# Altium footprint library aksima_footprint.PcbLib: 56 footprints (part 1 of 4)
Each footprint in its own frame and in the unit in brackets; x right, y up, seen from the top. Pads: shape width x height; smd on the part's side, far side on the other; paste and mask are expansions set on the pad; w line width, h text height; cw(c..) or ccw(c..) is an arc to the next point about the centre after c.
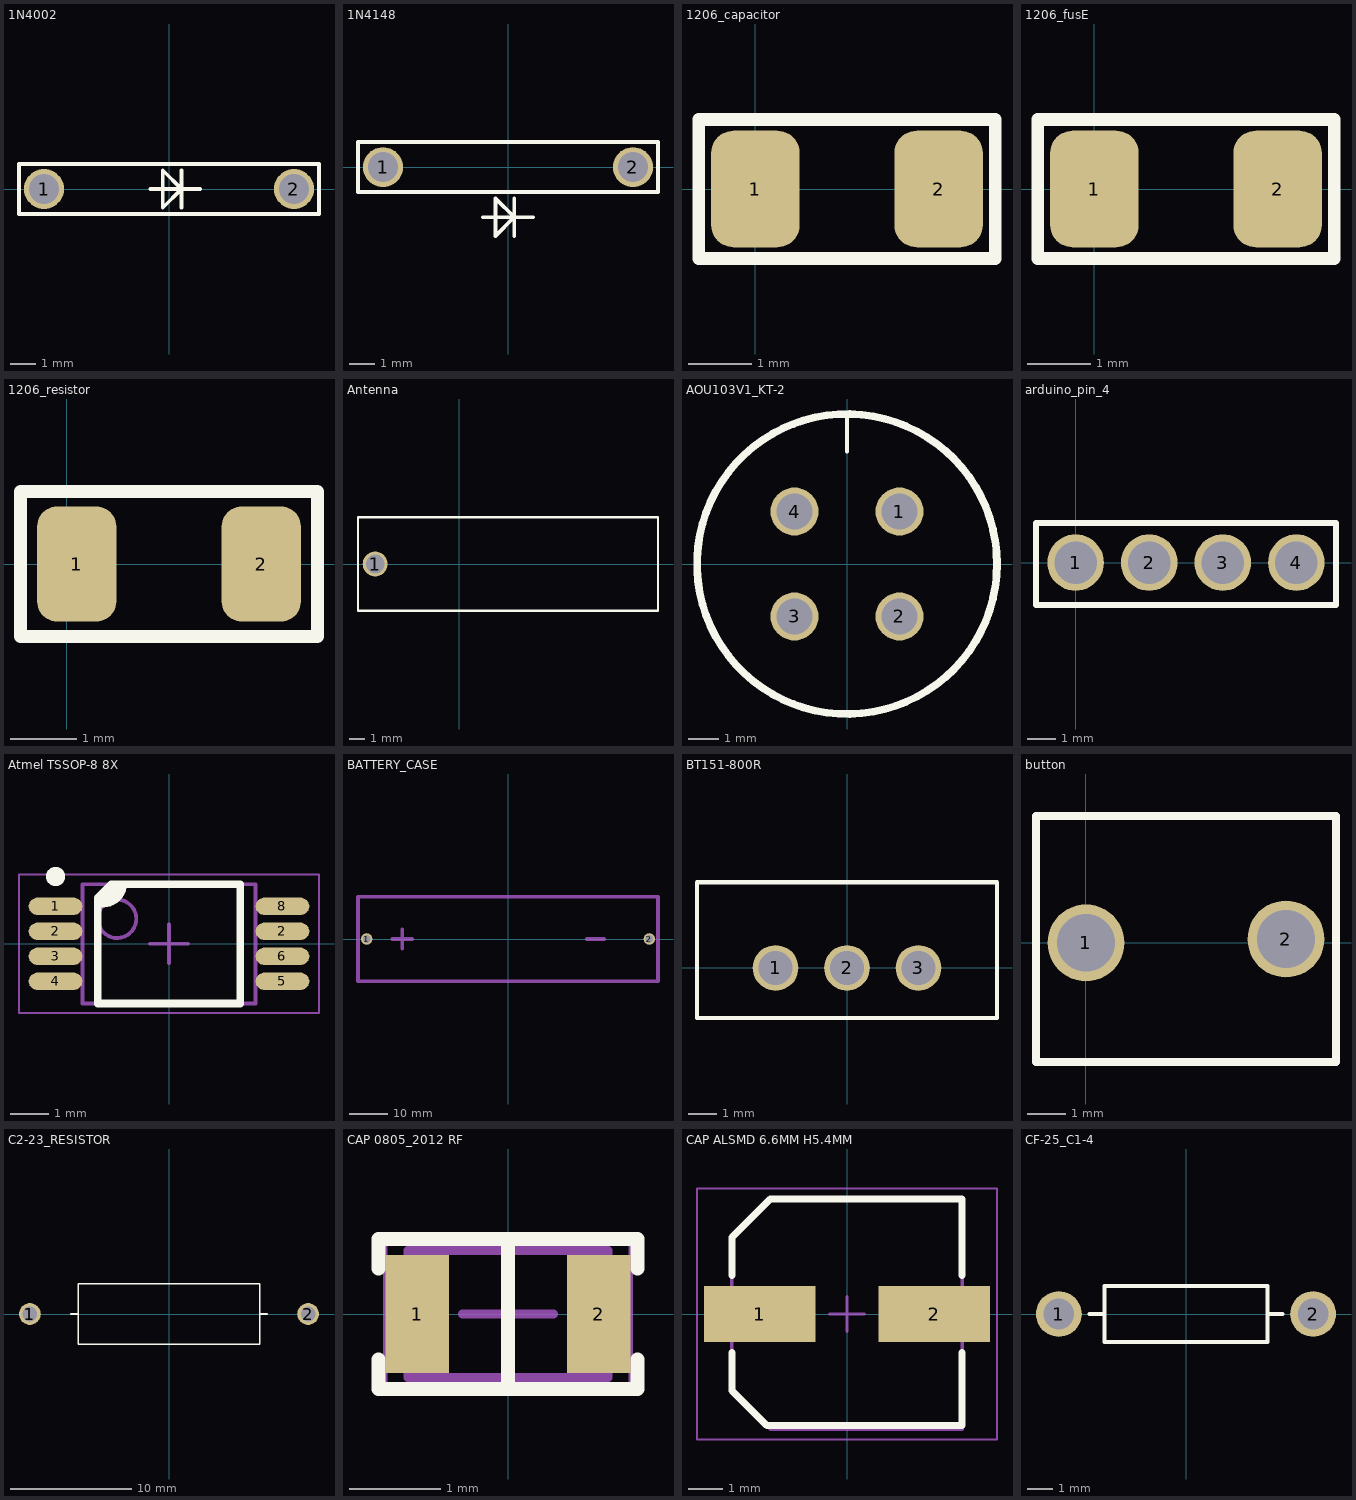
[diagram p0: the footprints below, top view; thin cyan lines are the x and y axes]

## 1N4002 [mm] "Axial rectifier diode, 1N4002"
pads (2):
  round 1.6 hole 1.2: 1(-5,0) 2(5,0)
Top Overlay:
  lines w0.15: -0.75,0 1.25,0 ; 0.5,-0.75 0.5,0.75 ; -6,-1 6,-1 6,1 -6,1 -6,0 -6,-1 ; -0.25,-0.75 0.5,0 -0.25,0.75 -0.25,-0.75 ; -0.25,0 -0.25,0
3D body "DO-204AL-BK.stp": height 2.8, standoff -2.5, extent -5.48,-1.34 5.48,1.34

## 1N4148 [mm] "Axial switching diode, 1N4148"
pads (2):
  round 1.6 hole 1.2: 1(-5,0) 2(5,0)
Top Overlay:
  lines w0.15: -1,-2 1,-2 ; 0.25,-2.75 0.25,-1.25 ; -0.5,-1.25 0.25,-2 -0.5,-2.75 -0.5,-1.25 ; -0.5,-1.25 -0.5,-1.25 ; -6,-1 6,-1 6,1 -6,1 -6,0 -6,-1 ; -0.5,-2 -0.5,-2
3D body "DIODE-1N4148.STEP": height 1.85, standoff -2.5, extent -5.31,-0.853 5.31,0.853

## 1206_capacitor [mm] "1206 capacitor footprint"
pads (2):
  rrect50% 1.4x1.85 smd: 1(0,0) 2(2.9,0)
Top Overlay:
  lines w0.2: -0.9,-1.1 3.8,-1.1 3.8,1.1 -0.9,1.1 -0.9,-1.1
3D body "CAPC1206.step": height 1, standoff 0, extent -0.1,-0.8 3.1,0.8

## 1206_fusE [mm] "Surface-mount fuse, 1206"
pads (2):
  rrect50% 1.4x1.85 smd: 1(0,0) 2(2.9,0)
Top Overlay:
  lines w0.2: -0.9,-1.1 -0.9,1.1 3.8,1.1 3.8,-1.1 -0.9,-1.1
3D body "Fuse_1206_3216Metric.step": height 0.5, standoff 0, extent -0.35,-0.92 3.15,0.92

## 1206_resistor [mm] "1206 resistor footprint"
pads (2):
  rrect50% 1.2x1.75 smd: 1(0.15,0) 2(2.95,0)
Top Overlay:
  lines w0.2: -0.7,-1.1 -0.7,1.1 3.8,1.1 3.8,-1.1 -0.7,-1.1
3D body "RES_3216_1206.step": height 0.85, standoff 0, extent -0.125,-0.865 3.225,0.865

## Antenna [mm] "Antenna footprint"
pads (1):
  round 1.6 hole 1.2: 1(-5.4,0)
Top Overlay:
  lines w0.15: -6.5,-3 -6.5,0 -6.5,3 12.75,3 12.75,-3 -6.5,-3
3D body "SW868-TH13.STEP": height 5.25, standoff -0.4, extent -5.8,-2.748 12.497,2.75

## AOU103V1_KT-2 [mm] "AOU103V1 optocoupler, KT-2 package"
pads (4):
  round 1.6 hole 1.2 unplated: 1(1.75,1.75) 2(1.75,-1.75) 3(-1.75,-1.75) 4(-1.75,1.75)
Top Overlay:
  circle w0.254: c0,0 r5
  lines w0.15: 0,3.75 0,5
3D body "??-2.STEP": height 6.6, standoff -3, extent -4.7,-4.7 4.7,5.4

## arduino_pin_4 [mm] "Four-position pin header"
pads (4):
  round 2 hole 1.5: 1(0,0) 2(2.6,0) 3(5.2,0) 4(7.8,0)
Top Overlay:
  lines w0.2: -1.4,-1.5 -1.4,1.4 9.2,1.4 9.2,-1.5 -1.4,-1.5
3D body "PLS-04.stp": height 8.2, standoff -3, extent -1.16,-1.298 9,1.2

## Atmel TSSOP-8 8X [mm] "TSSOP, 8-Leads, Body 3.00x4.40mm, Pitch 0.65mm, IPC Medium Density"
height 1.2
pads (8):
  oval 1.4x0.45 smd: 1(-2.95,0.975) 2(-2.95,0.325) 2(2.95,0.325) 3(-2.95,-0.325) 4(-2.95,-0.975) 5(2.95,-0.975) 6(2.95,-0.325) 8(2.95,0.975)
Top Overlay:
  circle w0.25: c-2.95,1.75 r0.125
  region: -1.5,1.55 -1.2,1.55 -1.2,1.451 -1.276,1.267 -1.417,1.126 -1.601,1.05 -1.7,1.05 -1.8,1.05 -1.8,1.25
  lines w0.2: -1.8,1.05 -1.7,1.05 ccw(c-1.7,1.55) -1.2,1.55 ; -1.85,-1.55 1.85,-1.55 1.85,1.55 -1.5,1.55 -1.85,1.2 -1.85,-1.55
Mechanical 13:
  circle w0.1: c-1.35,0.65 r0.5
  lines w0.1: -2.25,-1.55 -2.25,1.55 2.25,1.55 2.25,-1.55 -2.25,-1.55
Mechanical 15:
  lines w0.05: -3.9,-1.8 -3.9,1.8 3.9,1.8 3.9,-1.8 -3.9,-1.8
  lines w0.1: -0.5,0 0.5,0 ; 0,-0.5 0,0.5
3D body "TSSOP-8.STEP": height 1.2, standoff 0, extent -3.21,-1.5 3.211,1.5

## BATTERY_CASE [mm] "BATTERY CASE footprint"
pads (2):
  round 3 hole 2: 1(-36.75,0) 2(36.75,0)
Bottom 3D Body:
  lines w1: -39,10.5 -39,-11 39,-11 39,11 -39,11 ; -30,0 -25,0 ; -27.5,-2.5 -27.5,2.5 ; 20.5,0 25,0
3D body "Porta_18650.STEP": height 21, standoff -4, extent -38.5,-10 38.5,10

## BT151-800R [mm] "BT151-800R thyristor"
pads (3):
  round 1.6 hole 1.2 unplated: 1(-2.5,0) 2(0,0) 3(2.5,0)
Top Overlay:
  lines w0.15: -5.25,-1.75 5.25,-1.75 5.25,3 -5.25,3 -5.25,-1.75
3D body "TO220ShortLegs.SLDPRT": height 20, standoff -3, extent -5.16,-1.55 5.16,2.75

## button [mm] "button footprint"
pads (2):
  round 2 hole 1.5: 1(0,0) 2(5.2,0.1)
Top Overlay:
  lines w0.2: -1.3,-3.1 -1.3,-0.825 -1.3,0.625 -1.3,3.3 6.5,3.3 6.5,-3.1 -1.3,-3.1

## C2-23_RESISTOR [mm] "C2-23 RESISTOR footprint"
pads (2):
  round 1.8 hole 1.2: 1(-11.5,0) 2(11.5,0)
Top Overlay:
  lines w0.15: -8.1,0 -7.5,0 ; 7.5,0 8.1,0 ; -7.5,-2.5 -7.5,2.5 7.5,2.5 7.5,-2.5 -1.4,-2.5 -7.5,-2.5
3D body "Res-2w-5-15mm-900.step": height 6.5, standoff -1.5, extent -11.83,-2.5 11.83,2.5

## CAP 0805_2012 RF [mm] "Surface-mount capacitor, 0805 (2012 metric)"
height 1.15
pads (2):
  rect 0.7x1.3 smd: 1(-1,0) 2(1,0)
Top Overlay:
  lines w0.15: -1.425,-0.5 -1.425,-0.825 1.425,-0.825 1.425,-0.5 ; -1.425,0.5 -1.425,0.825 1.425,0.825 1.425,0.5 ; -0.025,0.825 0,0.825 0,-0.825
Mechanical 13:
  lines w0.1: -1.1,-0.7 1.1,-0.7 1.1,0.7 -1.1,0.7 -1.1,-0.7
Mechanical 15:
  lines w0.05: -1.35,-0.8 1.35,-0.8 1.35,0.8 -1.35,0.8 -1.35,-0.8
  lines w0.1: -0.5,0 0.5,0 ; 0,-0.5 0,0.5
3D body "0805 cap.STEP": height 1.26, standoff -0.02, extent -1,-0.637 1,0.637

## CAP ALSMD 6.6MM H5.4MM [mm] "SMD aluminum electrolytic capacitor, 6.6 mm footprint, 5.4 mm height"
height 5.4
pads (2):
  rect 3.2x1.6 smd: 1(-2.5,0) 2(2.5,0)
Top Overlay:
  lines w0.2: -3.3,-1.1 -3.3,-2.2 -2.3,-3.2 3.3,-3.2 3.3,-2.675 3.3,-1.625 3.3,-1.1 ; -3.3,1.1 -3.3,2.2 -2.2,3.3 3.3,3.3 3.3,1.1
Mechanical 13:
  lines w0.1: -3.3,-2.2 -3.3,2.2 -2.2,3.3 3.3,3.3 3.3,-3.3 -2.2,-3.3 -3.3,-2.2
Mechanical 15:
  lines w0.05: -4.3,-3.6 4.3,-3.6 4.3,3.6 -4.3,3.6 -4.3,-3.6
  lines w0.1: -0.5,0 0.5,0 ; 0,-0.5 0,0.5
3D body "CAP ALSMD - 6.6 x 6.6 x 5.4.step": height 5.4, standoff 0, extent -3.5,-3.3 3.5,3.3

## CF-25_C1-4 [mm] "Axial resistor, CF-25 / C1-4"
pads (2):
  round 1.8 hole 1.2: 1(-5,0) 2(5,0)
Top Overlay:
  lines w0.15: -3.8,0 -3.2,0 ; 3.2,0 3.8,0 ; -3.2,-1.1 -3.2,1.1 3.2,1.1 3.2,-1.1 0,-1.1 -3.2,-1.1
3D body "2.7R 0.4.STEP": height 2.93, standoff -2.54, extent -5.47,-1.156 5.3,1.156